# Altium footprint library VL53L1CXV0FY1.PcbLib: 1 footprints
Each footprint in its own frame and in the unit in brackets; x right, y up, seen from the top. Pads: shape width x height; smd on the part's side, far side on the other; paste and mask are expansions set on the pad; w line width, h text height; cw(c..) or ccw(c..) is an arc to the next point about the centre after c.
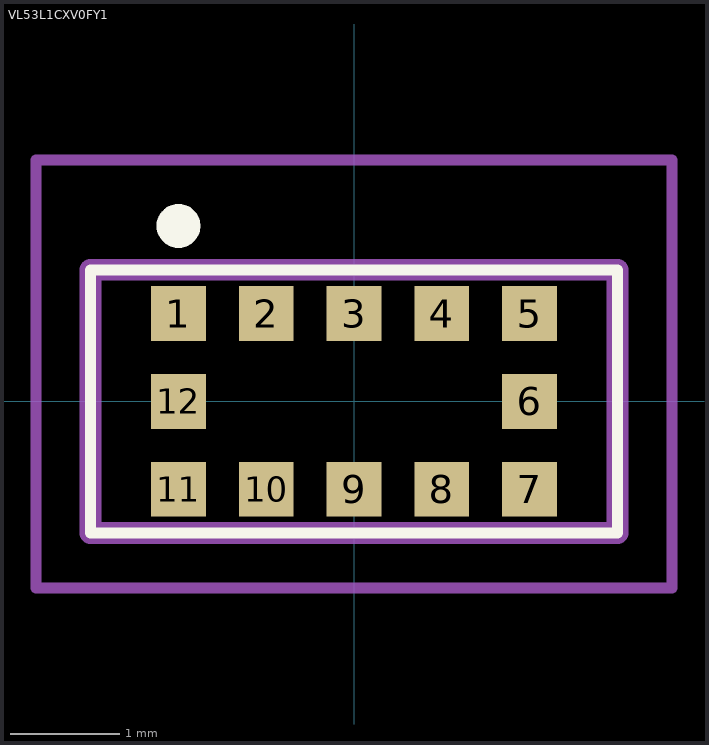
[diagram p0: the footprint, top view; thin cyan lines are the x and y axes]

## VL53L1CXV0FY1 [mm]
pads (12):
  rect 0.5x0.5 smd: 1(-1.6,0.8) 2(-0.8,0.8) 3(0,0.8) 4(0.8,0.8) 5(1.6,0.8) 6(1.6,0) 7(1.6,-0.8) 8(0.8,-0.8) 9(0,-0.8) 10(-0.8,-0.8) 11(-1.6,-0.8) 12(-1.6,0)
Top Overlay:
  lines w0.1: -2.4,-1.2 2.4,-1.2 2.4,1.2 -2.4,1.2 -2.4,-1.2
  lines w0.2: -1.7,1.6 -1.7,1.6 ; -1.7,1.6 cw(c-1.6,1.6) -1.5,1.6 ; -1.7,1.6 ccw(c-1.6,1.6) -1.5,1.6 ; -1.5,1.6 -1.5,1.6
Mechanical 15:
  lines w0.2: -2.4,-1.2 2.4,-1.2 2.4,1.2 -2.4,1.2 -2.4,-1.2
Mechanical 20:
  lines w0.1: -2.9,-1.7 2.9,-1.7 2.9,2.2 -2.9,2.2 -2.9,-1.7